# Altium schematic symbol library GRT155R60J475ME13J.SchLib: 1 symbol
Pins are listed as number, name and electrical type; pins without a type are passive.

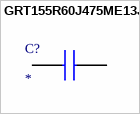
[diagram p0: symbol GRT155R60J475ME13J]

## GRT155R60J475ME13J
designator C?
SMD capacitor X5R(EIA) with capacitance 4.7uF Tol.20%. Rated voltage 6.3Vdc 85C; MF: Murata; MP: GRT155R60J475ME13J; SnapEDA_Link: https://www.snapeda.com/parts/GRT155R60J475ME13J/Murata/view-part/?ref=snap; Package: 1005 Taiyo Yuden; Value: *; Check_prices: https://www.snapeda.com/parts/GRT155R60J475ME13J/Murata/view-part/?ref=eda
footprint CAPC1005X60N
pins: 1, 2